# Altium schematic symbol library Schlib1.SchLib: 3 symbols
Pins are listed as number, name and electrical type; pins without a type are passive.

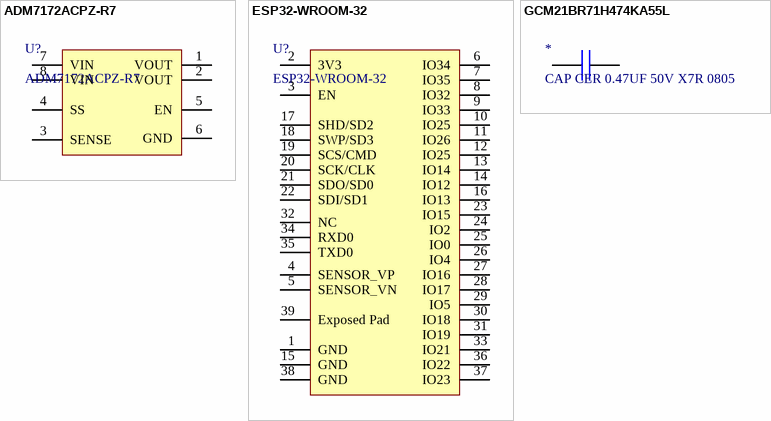
[diagram p0: symbols ADM7172ACPZ-R7 to GCM21BR71H474KA55L]

## ADM7172ACPZ-R7
designator U?
LDO Voltage Regulators 2A Hi PSRR FT L DO 3.3Vo; Manufacturer: Analog Devices; Manufacturer Part Number: ADM7172ACPZ-3.3-R7; Output Voltage: 3.3V; Dropout Voltage: 172mV; Number of Regulators: 1; Min Current Limit: 2.4A; Polarity: Positive; Quiescent Current: 700uA; Max Input Voltage: 6.5V; Min Input Voltage: 2.3V; Output Type: Fixed; Supplier 1: Digi-Key; Stock 1: 5037; Pricing 1: 1=4.89, 10=4.388, 100=3.5952, 500=3.06054 (USD); Mount: Surface Mount; Number of Pins: 8; Min Operating Temperature: -40°C; Max Operating Temperature: 125°C; Output Current: 2A; Packaging: Tape and Reel; Package Quantity: 1500; Max Output Current: 2A; Number of Outputs: 1; Lead Free: Contains Lead; Supplier Part Number 1: ADM7172ACPZ-3.3-R7CT-ND
pins: 1 VOUT, 2 VOUT, 3 SENSE, 4 SS, 5 EN, 6 GND, 7 VIN, 8 VIN

## ESP32-WROOM-32
designator U?
Manufacturer: Espressif Systems; Supplier 1: Digi-Key; Manufacturer Part Number: ESP32-WROOM-32; Stock 1: 550; Pricing 1: 550=4.05, 1100=3.645, 2750=3.51 (USD); Supplier Part Number 1: 1904-1010-2-ND
footprint ESP32-WROOM-32
pins: 1 GND, 2 3V3, 3 EN, 4 SENSOR_VP, 5 SENSOR_VN, 6 IO34, 7 IO35, 8 IO32, 9 IO33, 10 IO25, 11 IO26, 12 IO25, 13 IO14, 14 IO12, 15 GND, 16 IO13, 17 SHD/SD2, 18 SWP/SD3, 19 SCS/CMD, 20 SCK/CLK, 21 SDO/SD0, 22 SDI/SD1, 23 IO15, 24 IO2, 25 IO0, 26 IO4, 27 IO16, 28 IO17, 29 IO5, 30 IO18, 31 IO19, 32 NC, 33 IO21, 34 RXD0, 35 TXD0, 36 IO22, 37 IO23, 38 GND, 39 Exposed Pad

## GCM21BR71H474KA55L
designator *, comment CAP CER 0.47UF 50V X7R 0805
Manufacturer: Murata; Manufacturer Part Number: GCM21BR71H474KA55L; Capacitance: 470nF; Tolerance: 10%; Supplier 1: Digi-Key; Description: CAP CER 0.47UF 50V X7R 0805; Stock 1: 30000; Pricing 1: 1=0.39, 10=0.269, 100=0.1613, 500=0.12098, 1000=0.10216 (USD); Mount: Surface Mount; Case/Package: 0805; Case Code (Metric): 2012; Case Code (Imperial): 0805; Min Operating Temperature: -55°C; Max Operating Temperature: 125°C; Package Quantity: 3000; Packaging: Tape and Reel; Termination: SMD/SMT; Voltage Rating: 50V; Dielectric: X7R; Voltage Rating (DC): 50V; Voltage: 50V; Length: 2mm; Height: 1.25mm; Depth: 1.25mm; Width: 0.049inch; Thickness: 0.055inch; Ratings: AEC-Q200; Radiation Hardening: No; REACH SVHC: No SVHC; Lead Free: Lead Free; ComponentLink1URL: http://search.murata.co.jp/Ceramy/image/img/A01X/partnumbering_e_02.pdf; ComponentLink1Description: http://search.murata.co.jp/Ceramy/image/img/A01X/partnumbering_e_02.pdf; ComponentLink2URL: http://psearch.en.murata.com/capacitor/product/GCM21BR71H474KA55%23.pdf; ComponentLink2Description: http://psearch.en.murata.com/capacitor/product/GCM21BR71H474KA55%23.pdf; ComponentLink3URL: http://psearch.murata.com/capacitor/product/GCM21BR71H474KA55%23.pdf; ComponentLink3Description: http://psearch.murata.com/capacitor/product/GCM21BR71H474KA55%23.pdf; ComponentLink4URL: http://uk.rs-online.com/webdocs/0ef9/0900766b80ef92d0.pdf; ComponentLink4Description: http://uk.rs-online.com/webdocs/0ef9/0900766b80ef92d0.pdf; ComponentLink5URL: https://www.verical.com/server-webapp/html/getDatasheet?partID=223893; ComponentLink5Description: https://www.verical.com/server-webapp/html/getDatasheet?partID=223893; Supplier Part Number 1: 490-4788-1-ND
pins: 1, 2